# Altium schematic symbol library WSL1206R0250FEB.SchLib: 1 symbol
Pins are listed as number, name and electrical type; pins without a type are passive.

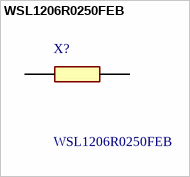
[diagram p0: symbol WSL1206R0250FEB]

## WSL1206R0250FEB
designator X?
Current Sense Resistors - SMD 1/4watt .025ohms 1%; Manufacturer_Name: Vishay; Geometry.Height: 0.889mm; Mouser Part Number: 71-WSL1206-0.025-E3; Mouser Price/Stock: https://www.mouser.co.uk/ProductDetail/Vishay-Dale/WSL1206R0250FEB?qs=X763L6ZzTB9Rxc1HFjvuWA%3D%3D; Manufacturer_Part_Number: WSL1206R0250FEB; Datasheet Link: https://www.vishay.com/docs/30100/wsl.pdf
footprint RESC3216X89N
pins: 1, 2